# Altium footprint library Module-RF.PcbLib: 19 footprints (part 2 of 2)
Each footprint in its own frame and in the unit in brackets; x right, y up, seen from the top. Pads: shape width x height; smd on the part's side, far side on the other; paste and mask are expansions set on the pad; w line width, h text height; cw(c..) or ccw(c..) is an arc to the next point about the centre after c.
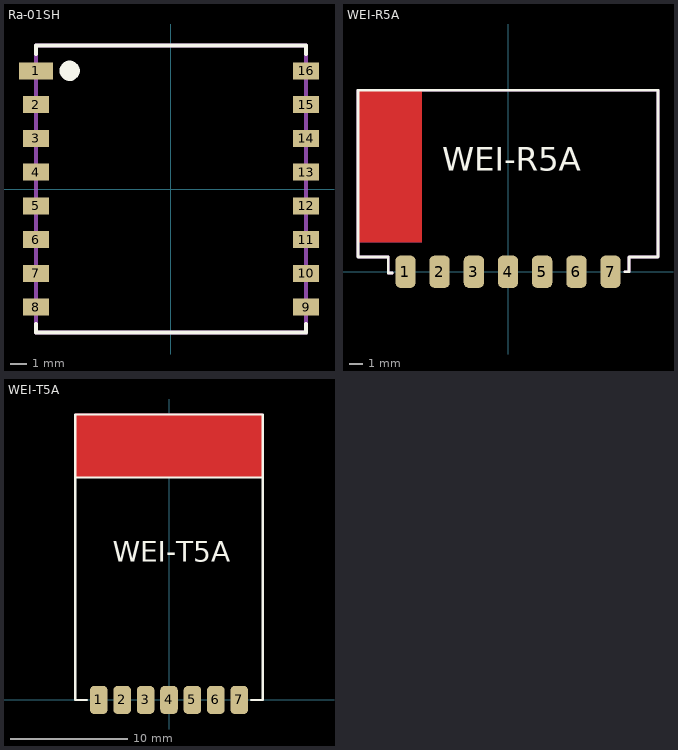
[diagram p1: the footprints below, top view; thin cyan lines are the x and y axes]

## Ra-01SH [mm] "LoRa 模组"
pads (16):
  rect 2x1 smd: 1(-8,7)
  rect 1.536x1 smd: 2(-8,5) 3(-8,3) 4(-8,1) 5(-8,-1) 6(-8,-3) 7(-8,-5) 8(-8,-7) 9(8,-7) 10(8,-5) 11(8,-3) 12(8,-1) 13(8,1) 14(8,3) 15(8,5) 16(8,7)
Top Overlay:
  circle w0.6: c-6,7 r0.3
  lines w0.25: -8,-8 -8,-8.5 8,-8.5 ; -8,8 -8,8.5 8,8.5 8,8 ; 8,-8 8,-8.5 ; 8,-8.5 ccw(c8,-8.5) 8,-8.5
Top Value:
  text "'.Comment'" at -5.3,-0.581 h2.54
Top Designator:
  text "'.Designator'" at -6.6,-0.456 h2.54
Top Assembly (Mech20):
  circle w0.2: c-6,7 r0.3
  lines w0.25: 8,-8.5 -7.996,-8.5 -7.996,8.496 -8,8.5 8,8.5 8,-8.5 ; 8,-8.5 8,-8.5
3D body "Ra-01H v1.step": height 3.2, standoff 0, extent -8,-8.5 8,8.5

## WEI-R5A [mm]
pads (7):
  rrect50% 1.5x2.4 smd: 1(-7.62,0) 2(-5.08,0) 3(-2.54,0) 4(0,0) 5(2.54,0) 6(5.08,0) 7(7.62,0)
Top Layer:
  pour cut-out: -6.4,2.203 -6.4,13.5 -11.114,13.5 -11.136,13.478 -11.136,2.196
Bottom Layer:
  pour cut-out: -6.4,2.203 -6.4,13.5 -11.114,13.5 -11.136,13.478 -11.136,2.196
Top Overlay:
  lines w0.2: -8.6,-0.1 -8.9,-0.1 -8.9,1.1 -11.15,1.1 -11.15,13.5 11.15,13.5 11.15,1.1 9,1.1 9,0 8.7,0
  text "WEI-R5A" at -4.887,6.895 h3
Top Value:
  text "'.Comment'" at -6.471,7.028 h3
Top Designator:
  text "'.Designator'" at -8.58,7.172 h3
Top Courtyard:
  lines w0.2: -8.6,-0.1 -8.9,-0.1 -8.9,1.1 -11.15,1.1 -11.15,13.5 11.15,13.5 11.15,1.1 9,1.1 9,0 8.7,0

## WEI-T5A [mm]
pads (7):
  rrect50% 1.5x2.4 smd: 1(-6,0) 2(-4,0) 3(-2,0) 4(0,0) 5(2,0) 6(4,0) 7(6,0)
Top Layer:
  pour cut-out: -8,24 -8,19 8,19 8,24.401 7.978,24.423 -8.001,24.423
  pour cut-out: -8,24 -8,19 8,19 8,24.401 7.978,24.423 -8.001,24.423
Bottom Layer:
  pour cut-out: -8,24 -8,19 8,19 8,24.401 7.978,24.423 -8.001,24.423
Top Overlay:
  lines w0.2: -8,19 8,19 ; -7,0 -8,0 -8,24.384 8,24.384 8,0 7,0
  text "WEI-T5A" at -4.787,11.195 h3
Top Value:
  text "'.Comment'" at -6.371,11.228 h3
Top Designator:
  text "'.Designator'" at -8.48,11.372 h3